# Altium footprint library AVR128DB28-ISO.PcbLib: 3 footprints
Each footprint in its own frame and in the unit in brackets; x right, y up, seen from the top. Pads: shape width x height; smd on the part's side, far side on the other; paste and mask are expansions set on the pad; w line width, h text height; cw(c..) or ccw(c..) is an arc to the next point about the centre after c.
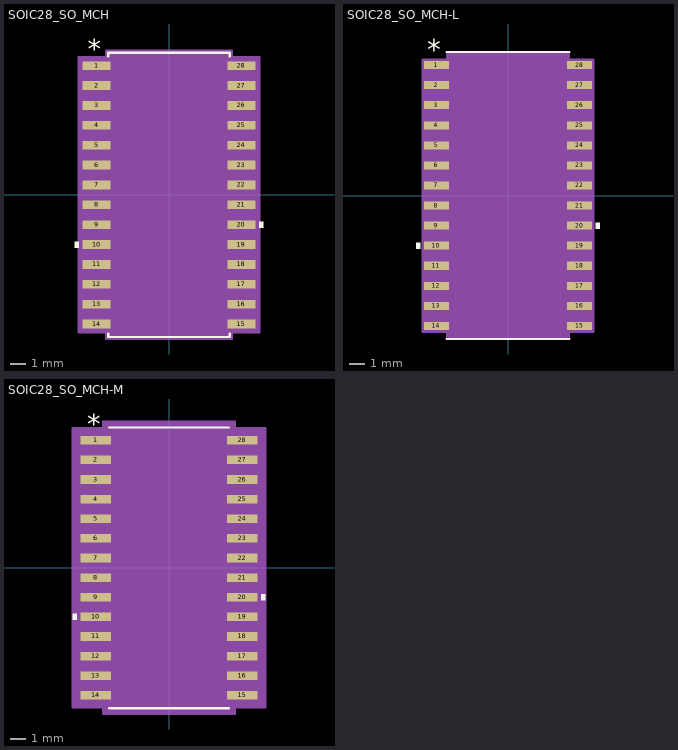
[diagram p0: the footprints below, top view; thin cyan lines are the x and y axes]

## SOIC28_SO_MCH [mil]
pads (28):
  rect 69.5x22 smd paste+0 mask+0: 1(-182.25,325) 2(-182.25,275) 3(-182.25,225) 4(-182.25,175) 5(-182.25,125) 6(-182.25,75) 7(-182.25,25) 8(-182.25,-25) 9(-182.25,-75) 10(-182.25,-125) 11(-182.25,-175) 12(-182.25,-225) 13(-182.25,-275) 14(-182.25,-325) 15(182.25,-325) 16(182.25,-275) 17(182.25,-225) 18(182.25,-175) 19(182.25,-125) 20(182.25,-75) 21(182.25,-25) 22(182.25,25) 23(182.25,75) 24(182.25,125) 25(182.25,175) 26(182.25,225) 27(182.25,275) 28(182.25,325)
Top Overlay:
  region: 227,-67.5 237,-67.5 237,-82.5 227,-82.5
  region: -227,-117.5 -237,-117.5 -237,-132.5 -227,-132.5
  lines w6: -152.5,-349.1 -152.5,-357.5 152.5,-357.5 152.5,-349.1 ; -152.5,349.1 -152.5,357.5 152.5,357.5 152.5,349.1
  text ".Designator" at -137.5,-25 h50
  text "*" at -204.75,342 h50
Mechanical 13:
  lines w1: -12,352.5 ccw(c0,352.5) 12,352.5 ; -203,-335 -147.5,-335 -147.5,-315 -203,-315 -203,-335 ; -203,-285 -147.5,-285 -147.5,-265 -203,-265 -203,-285 ; -203,-235 -147.5,-235 -147.5,-215 -203,-215 -203,-235 ; -203,-185 -147.5,-185 -147.5,-165 -203,-165 -203,-185 ; -203,-135 -147.5,-135 -147.5,-115 -203,-115 -203,-135 ; -203,-85 -147.5,-85 -147.5,-65 -203,-65 -203,-85 ; -203,-35 -147.5,-35 -147.5,-15 -203,-15 -203,-35 ; -203,15 -147.5,15 -147.5,35 -203,35 -203,15 ; -203,65 -147.5,65 -147.5,85 -203,85 -203,65 ; -203,115 -147.5,115 -147.5,135 -203,135 -203,115 ; -203,165 -147.5,165 -147.5,185 -203,185 -203,165 ; -203,215 -147.5,215 -147.5,235 -203,235 -203,215 ; -203,265 -147.5,265 -147.5,285 -203,285 -203,265 ; -203,315 -147.5,315 -147.5,335 -203,335 -203,315 ; -147.5,-352.5 -147.5,352.5 147.5,352.5 147.5,-352.5 -147.5,-352.5 ; 147.5,-335 203,-335 203,-315 147.5,-315 147.5,-335 ; 147.5,-285 203,-285 203,-265 147.5,-265 147.5,-285 ; 147.5,-235 203,-235 203,-215 147.5,-215 147.5,-235 ; 147.5,-185 203,-185 203,-165 147.5,-165 147.5,-185 ; 147.5,-135 203,-135 203,-115 147.5,-115 147.5,-135 ; 147.5,-85 203,-85 203,-65 147.5,-65 147.5,-85 ; 147.5,-35 203,-35 203,-15 147.5,-15 147.5,-35 ; 147.5,15 203,15 203,35 147.5,35 147.5,15 ; 147.5,65 203,65 203,85 147.5,85 147.5,65 ; 147.5,115 203,115 203,135 147.5,135 147.5,115 ; 147.5,165 203,165 203,185 147.5,185 147.5,165 ; 147.5,215 203,215 203,235 147.5,235 147.5,215 ; 147.5,265 203,265 203,285 147.5,285 147.5,265 ; 147.5,315 203,315 203,335 147.5,335 147.5,315
  text "*" at -145,299.5 h50
Mechanical 15:
  region: -157.5,-346 -227,-346 -227,346 -157.5,346 -157.5,362.5 157.5,362.5 157.5,346 227,346 227,-346 157.5,-346 157.5,-362.5 -157.5,-362.5
  lines w6: -227,-346 -157.5,-346 -157.5,-362.5 157.5,-362.5 157.5,-346 227,-346 227,346 157.5,346 157.5,362.5 -157.5,362.5 -157.5,346 -227,346 -227,-346
3D body "SOIC28_SO_MCH.step": height 104.09, standoff 0, extent -202.99,-352.52 202.99,352.52

## SOIC28_SO_MCH-L [mil]
pads (28):
  rect 61.5x20 smd paste+0 mask+0: 1(-178.25,325) 2(-178.25,275) 3(-178.25,225) 4(-178.25,175) 5(-178.25,125) 6(-178.25,75) 7(-178.25,25) 8(-178.25,-25) 9(-178.25,-75) 10(-178.25,-125) 11(-178.25,-175) 12(-178.25,-225) 13(-178.25,-275) 14(-178.25,-325) 15(178.25,-325) 16(178.25,-275) 17(178.25,-225) 18(178.25,-175) 19(178.25,-125) 20(178.25,-75) 21(178.25,-25) 22(178.25,25) 23(178.25,75) 24(178.25,125) 25(178.25,175) 26(178.25,225) 27(178.25,275) 28(178.25,325)
Top Overlay:
  region: -219,-117.5 -229,-117.5 -229,-132.5 -219,-132.5
  region: 219,-67.5 229,-67.5 229,-82.5 219,-82.5
  lines w6: -152.5,-357.5 152.5,-357.5 ; -152.5,357.5 152.5,357.5
  text "*" at -200.75,340 h50
  text ".Designator" at -137.5,-25 h50
Mechanical 13:
  lines w1: -12,352.5 ccw(c0,352.5) 12,352.5 ; -203,-335 -203,-315 -147.5,-315 -147.5,-335 -203,-335 ; -203,-285 -203,-265 -147.5,-265 -147.5,-285 -203,-285 ; -203,-235 -203,-215 -147.5,-215 -147.5,-235 -203,-235 ; -203,-185 -203,-165 -147.5,-165 -147.5,-185 -203,-185 ; -203,-135 -203,-115 -147.5,-115 -147.5,-135 -203,-135 ; -203,-85 -203,-65 -147.5,-65 -147.5,-85 -203,-85 ; -203,-35 -203,-15 -147.5,-15 -147.5,-35 -203,-35 ; -203,15 -203,35 -147.5,35 -147.5,15 -203,15 ; -203,65 -203,85 -147.5,85 -147.5,65 -203,65 ; -203,115 -203,135 -147.5,135 -147.5,115 -203,115 ; -203,165 -203,185 -147.5,185 -147.5,165 -203,165 ; -203,215 -203,235 -147.5,235 -147.5,215 -203,215 ; -203,265 -203,285 -147.5,285 -147.5,265 -203,265 ; -203,315 -203,335 -147.5,335 -147.5,315 -203,315 ; -147.5,-352.5 147.5,-352.5 147.5,352.5 -147.5,352.5 -147.5,-352.5 ; 147.5,-335 147.5,-315 203,-315 203,-335 147.5,-335 ; 147.5,-285 147.5,-265 203,-265 203,-285 147.5,-285 ; 147.5,-235 147.5,-215 203,-215 203,-235 147.5,-235 ; 147.5,-185 147.5,-165 203,-165 203,-185 147.5,-185 ; 147.5,-135 147.5,-115 203,-115 203,-135 147.5,-135 ; 147.5,-85 147.5,-65 203,-65 203,-85 147.5,-85 ; 147.5,-35 147.5,-15 203,-15 203,-35 147.5,-35 ; 147.5,15 147.5,35 203,35 203,15 147.5,15 ; 147.5,65 147.5,85 203,85 203,65 147.5,65 ; 147.5,115 147.5,135 203,135 203,115 147.5,115 ; 147.5,165 147.5,185 203,185 203,165 147.5,165 ; 147.5,215 147.5,235 203,235 203,215 147.5,215 ; 147.5,265 147.5,285 203,285 203,265 147.5,265 ; 147.5,315 147.5,335 203,335 203,315 147.5,315
  text ".Designator" at -137.5,-25 h50
  text "*" at -145,299.5 h50
Mechanical 15:
  region: -151.5,-339 -213,-339 -213,339 -151.5,339 -151.5,356.5 151.5,356.5 151.5,339 213,339 213,-339 151.5,-339 151.5,-356.5 -151.5,-356.5
  lines w6: -213,-339 -213,339 -151.5,339 -151.5,356.5 151.5,356.5 151.5,339 213,339 213,-339 151.5,-339 151.5,-356.5 -151.5,-356.5 -151.5,-339 -213,-339
3D body "SOIC28_SO_MCH.step": height 104.09, standoff 0, extent -202.99,-352.52 202.99,352.52

## SOIC28_SO_MCH-M [mil]
pads (28):
  rect 77.5x22 smd paste+0 mask+0: 1(-186.25,325) 2(-186.25,275) 3(-186.25,225) 4(-186.25,175) 5(-186.25,125) 6(-186.25,75) 7(-186.25,25) 8(-186.25,-25) 9(-186.25,-75) 10(-186.25,-125) 11(-186.25,-175) 12(-186.25,-225) 13(-186.25,-275) 14(-186.25,-325) 15(186.25,-325) 16(186.25,-275) 17(186.25,-225) 18(186.25,-175) 19(186.25,-125) 20(186.25,-75) 21(186.25,-25) 22(186.25,25) 23(186.25,75) 24(186.25,125) 25(186.25,175) 26(186.25,225) 27(186.25,275) 28(186.25,325)
Top Overlay:
  region: -235,-117.5 -245,-117.5 -245,-132.5 -235,-132.5
  region: 235,-67.5 245,-67.5 245,-82.5 235,-82.5
  lines w6: -152.5,-357.5 152.5,-357.5 ; -152.5,357.5 152.5,357.5
  text "*" at -208.75,342 h50
  text ".Designator" at -137.5,-25 h50
Mechanical 13:
  lines w1: -12,352.5 ccw(c0,352.5) 12,352.5 ; -203,-335 -203,-315 -147.5,-315 -147.5,-335 -203,-335 ; -203,-285 -203,-265 -147.5,-265 -147.5,-285 -203,-285 ; -203,-235 -203,-215 -147.5,-215 -147.5,-235 -203,-235 ; -203,-185 -203,-165 -147.5,-165 -147.5,-185 -203,-185 ; -203,-135 -203,-115 -147.5,-115 -147.5,-135 -203,-135 ; -203,-85 -203,-65 -147.5,-65 -147.5,-85 -203,-85 ; -203,-35 -203,-15 -147.5,-15 -147.5,-35 -203,-35 ; -203,15 -203,35 -147.5,35 -147.5,15 -203,15 ; -203,65 -203,85 -147.5,85 -147.5,65 -203,65 ; -203,115 -203,135 -147.5,135 -147.5,115 -203,115 ; -203,165 -203,185 -147.5,185 -147.5,165 -203,165 ; -203,215 -203,235 -147.5,235 -147.5,215 -203,215 ; -203,265 -203,285 -147.5,285 -147.5,265 -203,265 ; -203,315 -203,335 -147.5,335 -147.5,315 -203,315 ; -147.5,-352.5 147.5,-352.5 147.5,352.5 -147.5,352.5 -147.5,-352.5 ; 147.5,-335 147.5,-315 203,-315 203,-335 147.5,-335 ; 147.5,-285 147.5,-265 203,-265 203,-285 147.5,-285 ; 147.5,-235 147.5,-215 203,-215 203,-235 147.5,-235 ; 147.5,-185 147.5,-165 203,-165 203,-185 147.5,-185 ; 147.5,-135 147.5,-115 203,-115 203,-135 147.5,-135 ; 147.5,-85 147.5,-65 203,-65 203,-85 147.5,-85 ; 147.5,-35 147.5,-15 203,-15 203,-35 147.5,-35 ; 147.5,15 147.5,35 203,35 203,15 147.5,15 ; 147.5,65 147.5,85 203,85 203,65 147.5,65 ; 147.5,115 147.5,135 203,135 203,115 147.5,115 ; 147.5,165 147.5,185 203,185 203,165 147.5,165 ; 147.5,215 147.5,235 203,235 203,215 147.5,215 ; 147.5,265 147.5,285 203,285 203,265 147.5,265 ; 147.5,315 147.5,335 203,335 203,315 147.5,315
  text ".Designator" at -137.5,-25 h50
  text "*" at -145,299.5 h50
Mechanical 15:
  region: -167.5,-356 -245,-356 -245,356 -167.5,356 -167.5,372.5 167.5,372.5 167.5,356 245,356 245,-356 167.5,-356 167.5,-372.5 -167.5,-372.5
  lines w6: -245,-356 -245,356 -167.5,356 -167.5,372.5 167.5,372.5 167.5,356 245,356 245,-356 167.5,-356 167.5,-372.5 -167.5,-372.5 -167.5,-356 -245,-356
3D body "SOIC28_SO_MCH.step": height 104.09, standoff 0, extent -202.99,-352.52 202.99,352.52